# Altium footprint library Altium_Lib_Haris.PcbLib: 85 footprints (part 3 of 6)
Each footprint in its own frame and in the unit in brackets; x right, y up, seen from the top. Pads: shape width x height; smd on the part's side, far side on the other; paste and mask are expansions set on the pad; w line width, h text height; cw(c..) or ccw(c..) is an arc to the next point about the centre after c.
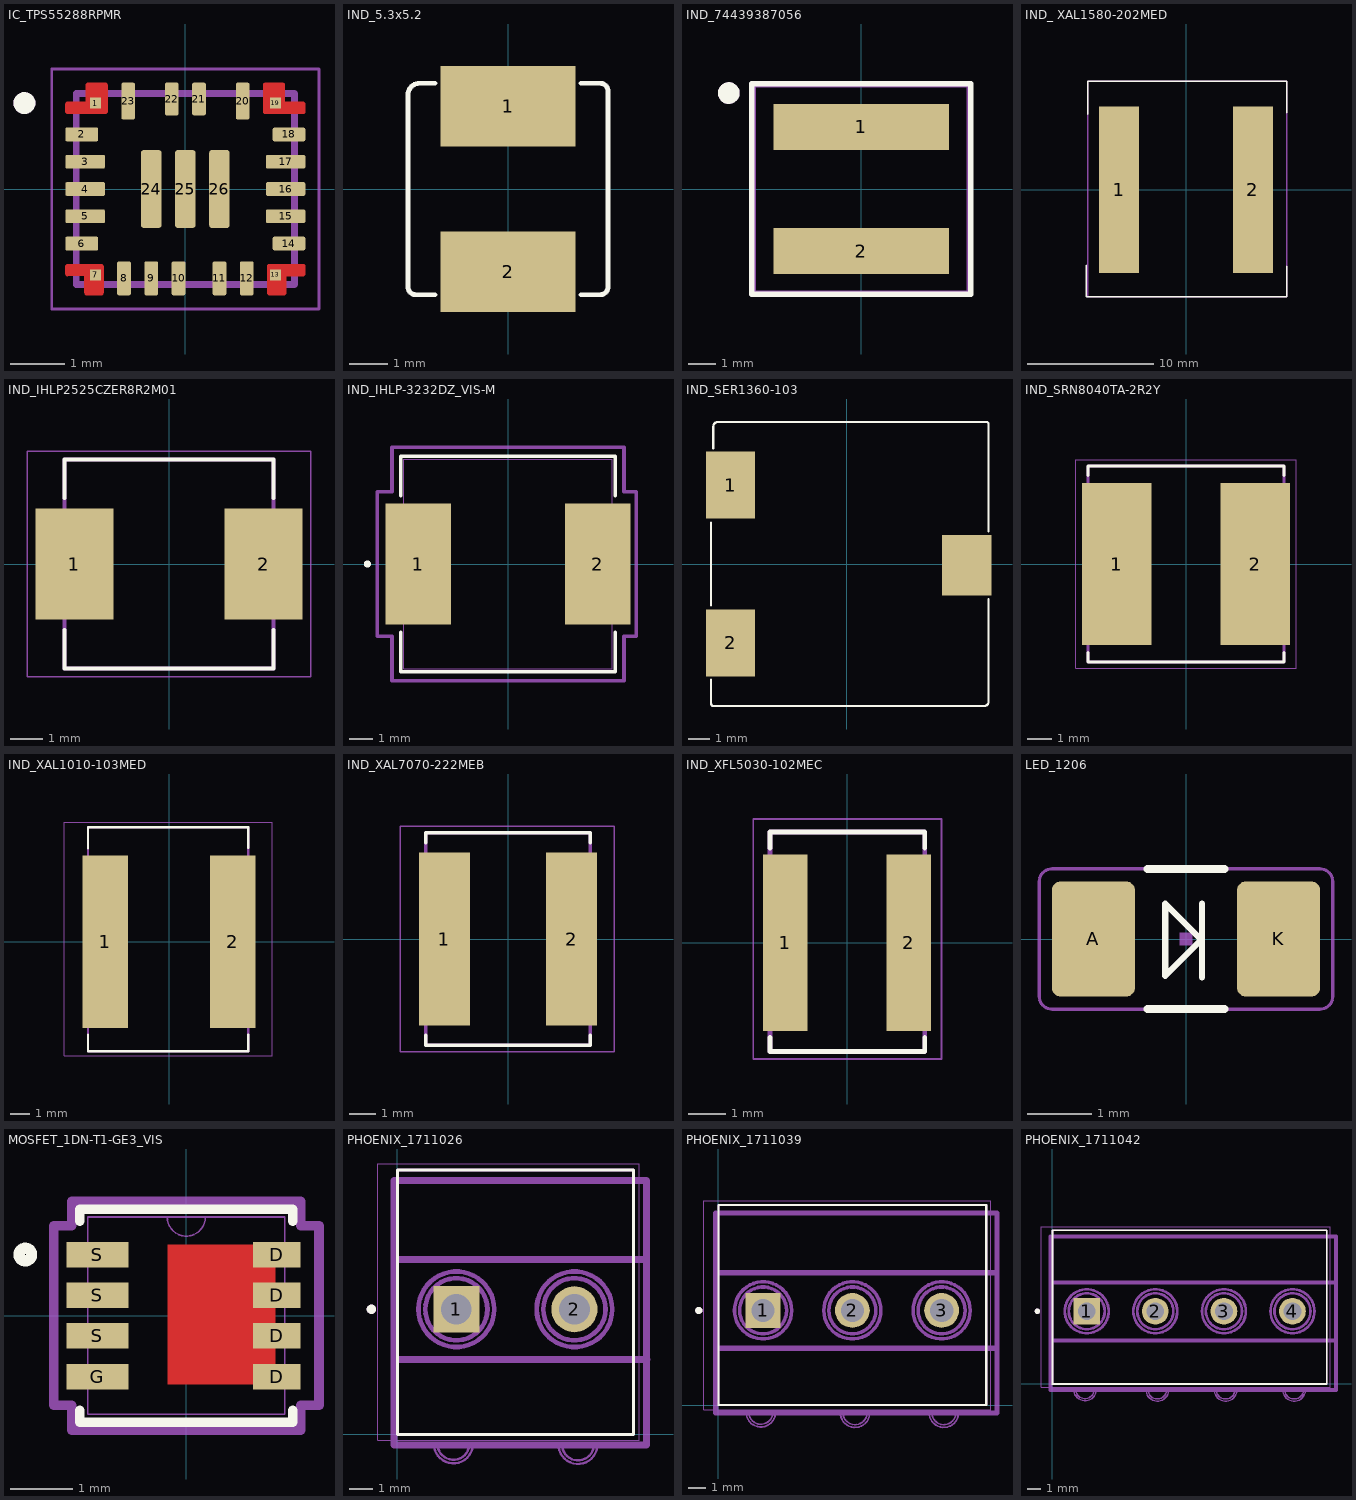
[diagram p2: the footprints below, top view; thin cyan lines are the x and y axes]

## IC_TPS55288RPMR [mm]
height 1
pads (26):
  rect 0.2x0.2 smd paste-1 mask+0: 1(-1.65,1.575) 7(-1.65,-1.575) 13(1.65,-1.575) 19(1.65,1.575)
  rrect20% 0.6x0.25 smd mask+0: 2(-1.9,1) 6(-1.9,-1)
  rrect20% 0.725x0.25 smd mask+0: 3(-1.837,0.5) 4(-1.837,0) 5(-1.837,-0.5)
  rrect25% 0.25x0.625 smd mask+0: 8(-1.125,-1.637) 9(-0.625,-1.637) 10(-0.125,-1.637) 11(0.625,-1.637) 12(1.125,-1.637)
  rrect25% 0.6x0.25 smd mask+0: 14(1.9,-1) 18(1.9,1)
  rrect25% 0.725x0.25 smd mask+0: 15(1.837,-0.5) 16(1.837,0) 17(1.837,0.5)
  rrect25% 0.25x0.675 smd mask+0: 20(1.05,1.613) 23(-1.05,1.613)
  rrect25% 0.25x0.6 smd mask+0: 21(0.25,1.65) 22(-0.25,1.65)
  rrect25% 0.375x1.425 smd mask+0: 24(-0.625,0) 25(0,0) 26(0.625,0)
Top Layer:
  region: 1.783,1.949 1.785,1.949 1.788,1.948 1.79,1.948 1.793,1.947 1.795,1.946 1.798,1.945 1.8,1.943 1.802,1.942 1.804,1.94 1.806,1.939 1.808,1.937 1.81,1.935 1.812,1.933 1.814,1.931 1.815,1.929 1.817,1.927 1.818,1.925 1.82,1.923 1.821,1.92 1.822,1.918 1.823,1.915 1.823,1.913 1.824,1.91 1.824,1.908 1.825,1.905 1.825,1.903 1.825,1.9 1.825,1.6 2.155,1.6 2.158,1.599 2.16,1.599 2.163,1.598 2.165,1.598 2.168,1.597 2.17,1.596 2.173,1.595 2.175,1.593 2.177,1.592 2.179,1.59 2.181,1.589 2.183,1.587 2.185,1.585 2.187,1.583 2.189,1.581 2.19,1.579 2.192,1.577 2.193,1.575 2.195,1.573 2.196,1.57 2.197,1.568 2.198,1.565 2.198,1.563 2.199,1.56 2.199,1.558 2.2,1.555 2.2,1.553 2.2,1.55 2.2,1.425 2.2,1.422 2.2,1.42 2.199,1.417 2.199,1.415 2.198,1.412 2.198,1.41 2.197,1.407 2.196,1.405 2.195,1.402 2.193,1.4 2.192,1.398 2.19,1.396 2.189,1.394 2.187,1.392 2.185,1.39 2.183,1.388 2.181,1.386 2.179,1.385 2.177,1.383 2.175,1.382 2.173,1.38 2.17,1.379 2.168,1.378 2.165,1.377 2.163,1.377 2.16,1.376 2.158,1.376 2.155,1.375 1.47,1.375 1.467,1.376 1.465,1.376 1.462,1.377 1.46,1.377 1.457,1.378 1.455,1.379 1.452,1.38 1.45,1.382 1.448,1.383 1.446,1.385 1.444,1.386 1.442,1.388 1.44,1.39 1.438,1.392 1.436,1.394 1.435,1.396 1.433,1.398 1.432,1.4 1.43,1.402 1.429,1.405 1.428,1.407 1.427,1.41 1.427,1.412 1.426,1.415 1.426,1.417 1.425,1.42 1.425,1.422 1.425,1.425 1.425,1.9 1.425,1.903 1.425,1.905 1.426,1.908 1.426,1.91 1.427,1.913 1.427,1.915 1.428,1.918 1.429,1.92 1.43,1.923 1.432,1.925 1.433,1.927 1.435,1.929 1.436,1.931 1.438,1.933 1.44,1.935 1.442,1.937 1.444,1.939 1.446,1.94 1.448,1.942 1.45,1.943 1.452,1.945 1.455,1.946 1.457,1.947 1.46,1.948 1.462,1.948 1.465,1.949 1.467,1.949 1.47,1.95 1.78,1.95
  region: 2.158,-1.376 2.16,-1.376 2.163,-1.377 2.165,-1.377 2.168,-1.378 2.17,-1.379 2.173,-1.38 2.175,-1.382 2.177,-1.383 2.179,-1.385 2.181,-1.386 2.183,-1.388 2.185,-1.39 2.187,-1.392 2.189,-1.394 2.19,-1.396 2.192,-1.398 2.193,-1.4 2.195,-1.402 2.196,-1.405 2.197,-1.407 2.198,-1.41 2.198,-1.412 2.199,-1.415 2.199,-1.417 2.2,-1.42 2.2,-1.422 2.2,-1.425 2.2,-1.55 2.2,-1.553 2.2,-1.555 2.199,-1.558 2.199,-1.56 2.198,-1.563 2.198,-1.565 2.197,-1.568 2.196,-1.57 2.195,-1.573 2.193,-1.575 2.192,-1.577 2.19,-1.579 2.189,-1.581 2.187,-1.583 2.185,-1.585 2.183,-1.587 2.181,-1.589 2.179,-1.59 2.177,-1.592 2.175,-1.593 2.173,-1.595 2.17,-1.596 2.168,-1.597 2.165,-1.598 2.163,-1.598 2.16,-1.599 2.158,-1.599 2.155,-1.6 1.85,-1.6 1.85,-1.9 1.85,-1.903 1.85,-1.905 1.849,-1.908 1.849,-1.91 1.848,-1.913 1.848,-1.915 1.847,-1.918 1.846,-1.92 1.845,-1.923 1.843,-1.925 1.842,-1.927 1.84,-1.929 1.839,-1.931 1.837,-1.933 1.835,-1.935 1.833,-1.937 1.831,-1.939 1.829,-1.94 1.827,-1.942 1.825,-1.943 1.823,-1.945 1.82,-1.946 1.818,-1.947 1.815,-1.948 1.813,-1.948 1.81,-1.949 1.808,-1.949 1.805,-1.95 1.545,-1.95 1.542,-1.949 1.54,-1.949 1.537,-1.948 1.535,-1.948 1.532,-1.947 1.53,-1.946 1.527,-1.945 1.525,-1.943 1.523,-1.942 1.521,-1.94 1.519,-1.939 1.517,-1.937 1.515,-1.935 1.513,-1.933 1.511,-1.931 1.51,-1.929 1.508,-1.927 1.507,-1.925 1.505,-1.923 1.504,-1.92 1.503,-1.918 1.502,-1.915 1.502,-1.913 1.501,-1.91 1.501,-1.908 1.5,-1.905 1.5,-1.903 1.5,-1.9 1.5,-1.425 1.5,-1.422 1.5,-1.42 1.501,-1.417 1.501,-1.415 1.502,-1.412 1.502,-1.41 1.503,-1.407 1.504,-1.405 1.505,-1.402 1.507,-1.4 1.508,-1.398 1.51,-1.396 1.511,-1.394 1.513,-1.392 1.515,-1.39 1.517,-1.388 1.519,-1.386 1.521,-1.385 1.523,-1.383 1.525,-1.382 1.527,-1.38 1.53,-1.379 1.532,-1.378 1.535,-1.377 1.537,-1.377 1.54,-1.376 1.542,-1.376 1.545,-1.375 2.155,-1.375
  region: -1.542,-1.376 -1.54,-1.376 -1.537,-1.377 -1.535,-1.377 -1.532,-1.378 -1.53,-1.379 -1.527,-1.38 -1.525,-1.382 -1.523,-1.383 -1.521,-1.385 -1.519,-1.386 -1.517,-1.388 -1.515,-1.39 -1.513,-1.392 -1.511,-1.394 -1.51,-1.396 -1.508,-1.398 -1.507,-1.4 -1.505,-1.402 -1.504,-1.405 -1.503,-1.407 -1.502,-1.41 -1.502,-1.412 -1.501,-1.415 -1.501,-1.417 -1.5,-1.42 -1.5,-1.422 -1.5,-1.425 -1.5,-1.9 -1.5,-1.903 -1.5,-1.905 -1.501,-1.908 -1.501,-1.91 -1.502,-1.913 -1.502,-1.915 -1.503,-1.918 -1.504,-1.92 -1.505,-1.923 -1.507,-1.925 -1.508,-1.927 -1.51,-1.929 -1.511,-1.931 -1.513,-1.933 -1.515,-1.935 -1.517,-1.937 -1.519,-1.939 -1.521,-1.94 -1.523,-1.942 -1.525,-1.943 -1.527,-1.945 -1.53,-1.946 -1.532,-1.947 -1.535,-1.948 -1.537,-1.948 -1.54,-1.949 -1.542,-1.949 -1.545,-1.95 -1.805,-1.95 -1.808,-1.949 -1.81,-1.949 -1.813,-1.948 -1.815,-1.948 -1.818,-1.947 -1.82,-1.946 -1.823,-1.945 -1.825,-1.943 -1.827,-1.942 -1.829,-1.94 -1.831,-1.939 -1.833,-1.937 -1.835,-1.935 -1.837,-1.933 -1.839,-1.931 -1.84,-1.929 -1.842,-1.927 -1.843,-1.925 -1.845,-1.923 -1.846,-1.92 -1.847,-1.918 -1.848,-1.915 -1.848,-1.913 -1.849,-1.91 -1.849,-1.908 -1.85,-1.905 -1.85,-1.903 -1.85,-1.9 -1.85,-1.6 -2.155,-1.6 -2.158,-1.599 -2.16,-1.599 -2.163,-1.598 -2.165,-1.598 -2.168,-1.597 -2.17,-1.596 -2.173,-1.595 -2.175,-1.593 -2.177,-1.592 -2.179,-1.59 -2.181,-1.589 -2.183,-1.587 -2.185,-1.585 -2.187,-1.583 -2.189,-1.581 -2.19,-1.579 -2.192,-1.577 -2.193,-1.575 -2.195,-1.573 -2.196,-1.57 -2.197,-1.568 -2.198,-1.565 -2.198,-1.563 -2.199,-1.56 -2.199,-1.558 -2.2,-1.555 -2.2,-1.553 -2.2,-1.55 -2.2,-1.425 -2.2,-1.422 -2.2,-1.42 -2.199,-1.417 -2.199,-1.415 -2.198,-1.412 -2.198,-1.41 -2.197,-1.407 -2.196,-1.405 -2.195,-1.402 -2.193,-1.4 -2.192,-1.398 -2.19,-1.396 -2.189,-1.394 -2.187,-1.392 -2.185,-1.39 -2.183,-1.388 -2.181,-1.386 -2.179,-1.385 -2.177,-1.383 -2.175,-1.382 -2.173,-1.38 -2.17,-1.379 -2.168,-1.378 -2.165,-1.377 -2.163,-1.377 -2.16,-1.376 -2.158,-1.376 -2.155,-1.375 -1.545,-1.375
  region: -1.467,1.949 -1.465,1.949 -1.462,1.948 -1.46,1.948 -1.457,1.947 -1.455,1.946 -1.452,1.945 -1.45,1.943 -1.448,1.942 -1.446,1.94 -1.444,1.939 -1.442,1.937 -1.44,1.935 -1.438,1.933 -1.436,1.931 -1.435,1.929 -1.433,1.927 -1.432,1.925 -1.43,1.923 -1.429,1.92 -1.428,1.918 -1.427,1.915 -1.427,1.913 -1.426,1.91 -1.426,1.908 -1.425,1.905 -1.425,1.903 -1.425,1.9 -1.425,1.425 -1.425,1.422 -1.425,1.42 -1.426,1.417 -1.426,1.415 -1.427,1.412 -1.427,1.41 -1.428,1.407 -1.429,1.405 -1.43,1.402 -1.432,1.4 -1.433,1.398 -1.435,1.396 -1.436,1.394 -1.438,1.392 -1.44,1.39 -1.442,1.388 -1.444,1.386 -1.446,1.385 -1.448,1.383 -1.45,1.382 -1.452,1.38 -1.455,1.379 -1.457,1.378 -1.46,1.377 -1.462,1.377 -1.465,1.376 -1.467,1.376 -1.47,1.375 -2.155,1.375 -2.158,1.376 -2.16,1.376 -2.163,1.377 -2.165,1.377 -2.168,1.378 -2.17,1.379 -2.173,1.38 -2.175,1.382 -2.177,1.383 -2.179,1.385 -2.181,1.386 -2.183,1.388 -2.185,1.39 -2.187,1.392 -2.189,1.394 -2.19,1.396 -2.192,1.398 -2.193,1.4 -2.195,1.402 -2.196,1.405 -2.197,1.407 -2.198,1.41 -2.198,1.412 -2.199,1.415 -2.199,1.417 -2.2,1.42 -2.2,1.422 -2.2,1.425 -2.2,1.55 -2.2,1.553 -2.2,1.555 -2.199,1.558 -2.199,1.56 -2.198,1.563 -2.198,1.565 -2.197,1.568 -2.196,1.57 -2.195,1.573 -2.193,1.575 -2.192,1.577 -2.19,1.579 -2.189,1.581 -2.187,1.583 -2.185,1.585 -2.183,1.587 -2.181,1.589 -2.179,1.59 -2.177,1.592 -2.175,1.593 -2.173,1.595 -2.17,1.596 -2.168,1.597 -2.165,1.598 -2.163,1.598 -2.16,1.599 -2.158,1.599 -2.155,1.6 -1.825,1.6 -1.825,1.9 -1.825,1.903 -1.825,1.905 -1.824,1.908 -1.824,1.91 -1.823,1.913 -1.823,1.915 -1.822,1.918 -1.821,1.92 -1.82,1.923 -1.818,1.925 -1.817,1.927 -1.815,1.929 -1.814,1.931 -1.812,1.933 -1.81,1.935 -1.808,1.937 -1.806,1.939 -1.804,1.94 -1.802,1.942 -1.8,1.943 -1.798,1.945 -1.795,1.946 -1.793,1.947 -1.79,1.948 -1.788,1.948 -1.785,1.949 -1.783,1.949 -1.78,1.95 -1.47,1.95
Top Overlay:
  circle w0.2: c-2.95,1.575 r0.1
Top Paste:
  drawing of 4 lines, arcs and shapes, not listed
Top Solder:
  drawing of 26 lines, arcs and shapes, not listed
Mechanical 13:
  circle w0.2: c-2.95,1.575 r0.1
  lines w0.127: -2,-1.75 2,-1.75 2,1.75 -2,1.75 -2,-1.75
Mechanical 15:
  lines w0.05: -2.45,-2.2 2.45,-2.2 2.45,2.2 -2.45,2.2 -2.45,-2.2
3D body "step_temp.STEP": height 1, standoff 0, extent -2,-1.75 2,1.75

## IND_5.3x5.2 [mm]
pads (2):
  rect 3.5x2.1 smd: 1(0,2.15) 2(0,-2.15)
Top Overlay:
  lines w0.127: -1.9,-2.75 -2.4,-2.75 cw(c-2.4,-2.55) -2.6,-2.55 -2.6,2.45 cw(c-2.3,2.45) -2.3,2.75 -1.9,2.75 ; 1.9,-2.75 2.4,-2.75 ccw(c2.4,-2.55) 2.6,-2.55 2.6,2.55 ccw(c2.4,2.55) 2.4,2.75 1.9,2.75
3D body "SRP5030HMCT-3R3M.stp": height 2.82, standoff 0.01, extent -2.625,-2.775 2.625,2.725

## IND_74439387056 [mm]
pads (2):
  rect 6.5x1.7 smd paste+0 mask+0.102: 1(0,2.3) 2(0,-2.3)
Top Overlay:
  circle w0.4: c-4.9,3.55 r0.2
  lines w0.2: -4.05,-3.9 -4.05,3.9 4.05,3.9 4.05,-3.9 -4.05,-3.9
Mechanical 13:
  circle w0.4: c-4.9,3.55 r0.2
  lines w0.1: -3.95,-3.8 -3.95,3.8 3.95,3.8 3.95,-3.8 -3.95,-3.8
3D body "STP_WE-XHMI-7070+%28rev1%29.stp": height 7.4, standoff 0.01, extent -3.925,-3.775 3.975,3.825

## IND_ XAL1580-202MED [mm]
pads (2):
  rect 3.18x13.2 smd paste+0 mask+0.102: 1(-5.3,0) 2(5.3,0)
Top Overlay:
  lines w0.127: -7.9,-6 -7.9,-8.5 8,-8.5 8,-6.1 ; -7.8,6 -7.8,8.6 8,8.6 8,6.1
Mechanical 13:
  lines w0.127: -7.8,-8.5 -7.8,8.6 8,8.6 8,-8.5 -7.8,-8.5
Mechanical 15:
  lines w0.05: -7.8,-8.5 8,-8.5 8,8.6 -7.8,8.6 -7.8,-8.5
3D body "XAL1580-102.STEP": height 8.21, standoff 0.01, extent -7.6,-8.1 7.8,8.3

## IND_IHLP2525CZER8R2M01 [mil]
height 118.11
pads (2):
  rect 95x135 smd: 1(-115,0) 2(115,0)
Top Overlay:
  lines w5: -127.36,-80.1 -127.36,-127.36 127.36,-127.36 127.36,-80.1 ; -127.36,80.1 -127.36,127.36 127.36,127.36 127.36,80.1
Mechanical 13:
  lines w5: -127.36,-127.36 127.36,-127.36 127.36,127.36 -127.36,127.36 -127.36,-127.36
Mechanical 15:
  lines w1.97: -172.34,-137.2 172.34,-137.2 172.34,137.2 -172.34,137.2 -172.34,-137.2
3D body "IHLP2525CZER8R2M01.STEP": height 118.61, standoff 0.5, extent -135.04,-126.38 135.04,128.35

## IND_IHLP-3232DZ_VIS-M [mil]
pads (2):
  rect 110x203 smd paste+0 mask+0: 1(-150.59,0) 2(150.59,0)
Top Overlay:
  circle w6: c-236.22,0 r3
  lines w6: -180,-114.6 -180,-181 180,-181 180,-114.6 ; -180,114.6 -180,181 180,181 180,114.6
Mechanical 13:
  circle w0: c-155,0 r3
  lines w1: -175,-176 175,-176 175,176 -175,176 -175,-176
Mechanical 15:
  lines w6: -219.49,-121.5 -219.49,121.5 -195,121.5 -195,196 195,196 195,121.5 215.55,121.5 215.55,-121.5 195,-121.5 195,-196 -195,-196 -195,-121.5 -219.49,-121.5
3D body "IND_IHLP-3232DZ_VIS.step": height 158.11, standoff 0, extent -162.48,-162.48 162.48,162.48

## IND_SER1360-103 [mm]
pads (3):
  rect 2.26x3.07 smd: 1(-5.312,3.613) 2(-5.312,-3.612)
  rect 2.26x2.77 smd: ""(5.5,-0.05)
Top Overlay:
  lines w0.1: -6.2,-5.3 -6.2,-6.4 ccw(c-6.1,-6.4) -6.1,-6.5 6.3,-6.5 ccw(c6.3,-6.3) 6.5,-6.3 6.5,-1.6 ; -6.2,-1.9 -6.2,1.9 ; -6.1,5.3 -6.1,6.3 cw(c-5.9,6.3) -5.9,6.5 6.4,6.5 cw(c6.4,6.4) 6.5,6.4 6.5,1.5
3D body "SER1360.STEP": height 5.81, standoff 0.01, extent -6.325,-6.45 6.675,6.45

## IND_SRN8040TA-2R2Y [mm]
pads (2):
  rect 2.85x6.6 smd paste+0 mask+0.102: 1(-2.825,0) 2(2.825,0)
Top Overlay:
  lines w0.127: -4,-3.615 -4,-4 4,-4 4,-3.615 ; -4,3.615 -4,4 4,4 4,3.615
Mechanical 13:
  lines w0.127: -4,-4 4,-4 4,4 -4,4 -4,-4
Mechanical 15:
  lines w0.05: -4.5,-4.25 -4.5,4.25 4.5,4.25 4.5,-4.25 -4.5,-4.25
3D body "step_temp.STEP": height 4, standoff 0, extent -4,-4 4,4

## IND_XAL1010-103MED [mm]
pads (2):
  rect 2.38x9 smd paste+0 mask+0.102: 1(-3.325,0) 2(3.325,0)
Top Overlay:
  lines w0.127: -4.225,-4.85 -4.225,-5.725 4.125,-5.725 4.125,-4.85 ; -4.225,4.875 -4.225,5.975 4.125,5.975 4.125,4.9
Mechanical 13:
  lines w0.127: -4.225,-5.725 -4.225,5.975 4.125,5.975 4.125,-5.725 -4.225,-5.725
Mechanical 15:
  lines w0.05: -5.475,-5.95 5.375,-5.95 5.375,6.225 -5.475,6.225 -5.475,-5.95
3D body "XAL1010.STEP": height 10.01, standoff 0.01, extent -5.275,-5.775 5.225,6.025

## IND_XAL7070-222MEB [mm]
pads (2):
  rect 1.92x6.5 smd paste+0 mask+0.102: 1(-2.4,0) 2(2.4,0)
Top Overlay:
  lines w0.127: -3.1,-3.615 -3.1,-4 3.1,-4 3.1,-3.615 ; -3.1,3.615 -3.1,4 3.1,4 3.1,3.615
Mechanical 13:
  lines w0.127: -3.1,-4 -3.1,4 3.1,4 3.1,-4 -3.1,-4
Mechanical 15:
  lines w0.05: -4.05,-4.25 4,-4.25 4,4.25 -4.05,4.25 -4.05,-4.25
3D body "XAL7070.STEP": height 7.01, standoff 0.01, extent -3.85,-4 3.85,4

## IND_XFL5030-102MEC [mm]
pads (2):
  rect 1.18x4.7 smd paste+0 mask+0.102: 1(-1.65,0) 2(1.65,0)
Top Overlay:
  lines w0.127: -2.05,-2.525 -2.05,-2.9 2.075,-2.9 2.075,-2.525 ; -2.05,2.525 -2.05,2.95 2.075,2.95 2.075,2.525
Mechanical 13:
  lines w0.127: -2.05,-2.9 2.075,-2.9 2.075,2.95 -2.05,2.95 -2.05,-2.9
Mechanical 15:
  lines w0.05: -2.5,-3.1 -2.5,3.3 2.525,3.3 2.525,-3.1 -2.5,-3.1
3D body "XGL5030-102.STEP": height 3.11, standoff 0.01, extent -2.715,-2.915 2.765,2.765

## LED_1206 [mm] "1206"
height 0.71
pads (2):
  rrect20% 1.3x1.8 smd: A(-1.45,0) K(1.45,0)
Top Overlay:
  lines w0.1: 0.225,-0.025 0.237,-0.012 ; 0.25,-0.6 0.25,0.55 ; 0.237,-0.012 -0.325,-0.575 -0.325,0.55 0.237,-0.012
  lines w0.125: -0.6,-1.1 0.6,-1.1 ; -0.6,1.1 0.6,1.1
Top Courtyard:
  rectangle: -0.1,-0.1 0.1,0.1
Mechanical 15:
  lines w0.05: -2.3,-0.9 ccw(c-2.1,-0.9) -2.1,-1.1 2.1,-1.1 ccw(c2.1,-0.9) 2.3,-0.9 2.3,0.9 ccw(c2.1,0.9) 2.1,1.1 -2.1,1.1 ccw(c-2.1,0.9) -2.3,0.9 -2.3,-0.9
3D body "LED_1206_Green.stp": height 0.9, standoff 0, extent -1.66,-0.85 1.61,0.8

## MOSFET_1DN-T1-GE3_VIS [mm]
pads (8):
  rect 0.76x0.406 smd paste+0: D(1.445,-0.975) D(1.445,-0.325) D(1.445,0.325) D(1.445,0.975)
  rect 0.99x0.406 smd paste-0.203: G(-1.421,-0.975) S(-1.421,-0.325) S(-1.421,0.325)
  rect 0.99x0.406 smd paste+0 mask+0.102: S(-1.421,0.975)
Top Layer:
  rectangle: -0.3,-1.1 1.425,1.135
  region: 0,1.118
  region: 0,-1.118
Top Overlay:
  circle w0.18: c-2.573,0.975 r0.1
  lines w0.152: -1.702,-1.511 -1.702,-1.702 1.702,-1.702 1.702,-1.511 ; -1.702,1.511 -1.702,1.702 1.702,1.702 1.702,1.511
Top Solder:
  region: 0,1.118
  region: 0,-1.118
Mechanical 13:
  circle w0.025: c-1.308,0.975 r0.076
  lines w0.025: -0.305,1.575 ccw(c0,1.575) 0.305,1.575 ; -1.575,-1.575 1.575,-1.575 1.575,1.575 -1.575,1.575 -1.575,-1.575
Mechanical 15:
  lines w0.152: -2.121,-1.432 -2.121,1.432 -1.829,1.432 -1.829,1.829 1.829,1.829 1.829,1.432 2.121,1.432 2.121,-1.432 1.829,-1.432 1.829,-1.829 -1.829,-1.829 -1.829,-1.432 -2.121,-1.432
3D body "SI7613DN-T1-GE3_PAK1212-8.STEP": height 1.13, standoff 0.01, extent -1.676,-1.651 1.626,1.651

## PHOENIX_1711026 [mm]
height 18.2
pads (2):
  rect 1.95x1.95 / inner round 1.95 / far side rect 1.95x1.95 hole 1.3: 1(2.5,5.3)
  round 1.95 hole 1.3: 2(7.5,5.3)
Top Overlay:
  circle w0.2: c-1.1,5.3 r0.1
  lines w0.127: 0,0 10,0 10,11.2 0,11.2 0,0
Top Assembly:
  circle w0.2: c-1.1,5.3 r0.1
  circle w0.2: c2.5,5.3 r1.601
  circle w0.2: c2.5,5.3 r1.316
  circle w0.2: c7.5,5.3 r1.316
  circle w0.2: c7.5,5.3 r1.601
  lines w0.1: 1.548,-0.376 ccw(c2.375,-0.4) 3.201,-0.35 ; 1.7,-0.375 ccw(c2.375,-0.4) 3.049,-0.35 ; 6.823,-0.401 ccw(c7.65,-0.425) 8.476,-0.375 ; 6.975,-0.4 ccw(c7.65,-0.425) 8.324,-0.375
  lines w0.3: -0.125,7.4 10.525,7.4 ; -0.075,3.175 10.575,3.175 ; -0.147,-0.449 10.55,-0.449 10.55,10.751 -0.147,10.751 -0.147,-0.449
Mechanical 13:
  lines w0.127: 0,0 10,0 10,11.2 0,11.2 0,0
Mechanical 15:
  lines w0.05: -0.82,-0.25 10.25,-0.25 10.25,11.45 -0.82,11.45 -0.82,-0.25
3D body "pxc_1711026_07_01_MKDS-3-2_3D.stp": height 18, standoff -5, extent -0.05,-0.5 10.55,10.65

## PHOENIX_1711039 [mm]
pads (3):
  rect 1.95x1.95 / inner round 1.95 / far side rect 1.95x1.95 hole 1.3: 1(2.5,5.3)
  round 1.95 hole 1.3: 2(7.5,5.3) 3(12.5,5.3)
Top Overlay:
  circle w0.2: c-1.1,5.3 r0.1
  lines w0.127: 0,0 0,11.2 15,11.2 15,0 0,0
Top Assembly:
  circle w0.2: c12.5,5.3 r1.316
  circle w0.2: c12.5,5.3 r1.601
  circle w0.2: c-1.1,5.3 r0.1
  circle w0.2: c2.5,5.3 r1.601
  circle w0.2: c2.5,5.3 r1.316
  circle w0.2: c7.5,5.3 r1.316
  circle w0.2: c7.5,5.3 r1.601
  lines w0.1: 1.548,-0.376 ccw(c2.375,-0.4) 3.201,-0.35 ; 1.7,-0.375 ccw(c2.375,-0.4) 3.049,-0.35 ; 6.823,-0.401 ccw(c7.65,-0.425) 8.476,-0.375 ; 6.975,-0.4 ccw(c7.65,-0.425) 8.324,-0.375 ; 11.798,-0.401 ccw(c12.625,-0.425) 13.451,-0.375 ; 11.95,-0.4 ccw(c12.625,-0.425) 13.299,-0.375
  lines w0.3: -0.125,7.4 15.575,7.4 ; -0.075,3.175 15.575,3.175 ; -0.147,-0.449 15.6,-0.449 15.6,10.751 -0.147,10.751 -0.147,-0.449
Mechanical 13:
  circle w0.2: c-1.1,5.3 r0.1
  lines w0.127: 0,0 0,11.2 15,11.2 15,0 0,0
Mechanical 15:
  lines w0.05: -0.82,-0.25 -0.82,11.45 15.25,11.45 15.25,-0.25 -0.82,-0.25
3D body "pxc_1711039_07_00_MKDS-3-3_3D.stp": height 18, standoff -5, extent -0.053,-0.508 15.547,10.642

## PHOENIX_1711042 [mm]
pads (4):
  rect 1.95x1.95 / inner round 1.95 / far side rect 1.95x1.95 hole 1.3: 1(2.5,5.3)
  round 1.95 hole 1.3: 2(7.5,5.3) 3(12.5,5.3) 4(17.5,5.3)
Top Overlay:
  circle w0.2: c-1.1,5.3 r0.1
  lines w0.127: 0,0 20,0 20,11.2 0,11.2 0,0
Top Assembly:
  circle w0.2: c17.5,5.3 r1.601
  circle w0.2: c17.5,5.3 r1.316
  circle w0.2: c7.5,5.3 r1.601
  circle w0.2: c7.5,5.3 r1.316
  circle w0.2: c2.5,5.3 r1.316
  circle w0.2: c2.5,5.3 r1.601
  circle w0.2: c-1.1,5.3 r0.1
  circle w0.2: c12.5,5.3 r1.601
  circle w0.2: c12.5,5.3 r1.316
  lines w0.1: 1.548,-0.376 ccw(c2.375,-0.4) 3.201,-0.35 ; 1.7,-0.375 ccw(c2.375,-0.4) 3.049,-0.35 ; 6.823,-0.401 ccw(c7.65,-0.425) 8.476,-0.375 ; 6.975,-0.4 ccw(c7.65,-0.425) 8.324,-0.375 ; 11.798,-0.401 ccw(c12.625,-0.425) 13.451,-0.375 ; 11.95,-0.4 ccw(c12.625,-0.425) 13.299,-0.375 ; 16.798,-0.401 ccw(c17.625,-0.425) 18.451,-0.375 ; 16.95,-0.4 ccw(c17.625,-0.425) 18.299,-0.375
  lines w0.3: -0.125,7.4 20.65,7.4 ; -0.075,3.175 20.625,3.175 ; -0.147,-0.449 -0.147,10.751 20.675,10.751 20.675,-0.449 -0.147,-0.449
Mechanical 13:
  circle w0.2: c-1.1,5.3 r0.1
  lines w0.127: 0,0 20,0 20,11.2 0,11.2 0,0
Mechanical 15:
  lines w0.05: -0.82,-0.25 20.25,-0.25 20.25,11.45 -0.82,11.45 -0.82,-0.25
3D body "pxc_1711042_05_01_MKDS-3-4_3D.stp": height 18, standoff -5, extent -0.025,-0.5 20.575,10.65